# Altium integrated library LTC4417HUF_PBF.IntLib: 1 symbol
Pins are listed as number, name and electrical type; pins without a type are passive.

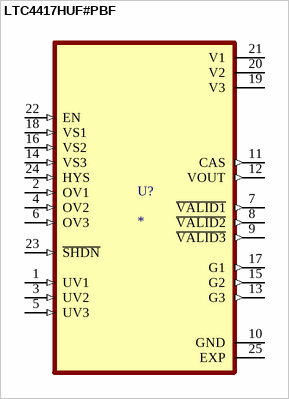
[diagram p0: symbol LTC4417HUF#PBF]

## LTC4417HUF#PBF
designator U?
Prioritized PowerPath Controller; MF: Analog Devices; MP: LTC4417HUF#PBF; SnapEDA_Link: https://www.snapeda.com/parts/LTC4417HUF%23PBF/Analog+Devices/view-part/?ref=snap; Package: QFN -24 Analog Devices; Value: *; Check_prices: https://www.snapeda.com/parts/LTC4417HUF%23PBF/Analog+Devices/view-part/?ref=eda
footprint QFN50P400X400X80-25N
pins: 1 UV1 (in), 2 OV1 (in), 3 UV2 (in), 4 OV2 (in), 5 UV3 (in), 6 OV3 (in), 7 ~{VALID1} (out), 8 ~{VALID2} (out), 9 ~{VALID3} (out), 10 GND (power), 11 CAS (out), 12 VOUT (out), 13 G3 (out), 14 VS3 (in), 15 G2 (out), 16 VS2 (in), 17 G1 (out), 18 VS1 (in), 19 V3 (power), 20 V2 (power), 21 V1 (power), 22 EN (in), 23 ~{SHDN} (in), 24 HYS (in), 25 EXP (power)